# Altium footprint library chipfc_libs.PCBLIB: 315 footprints (part 4 of 20)
Each footprint in its own frame and in the unit in brackets; x right, y up, seen from the top. Pads: shape width x height; smd on the part's side, far side on the other; paste and mask are expansions set on the pad; w line width, h text height; cw(c..) or ccw(c..) is an arc to the next point about the centre after c.
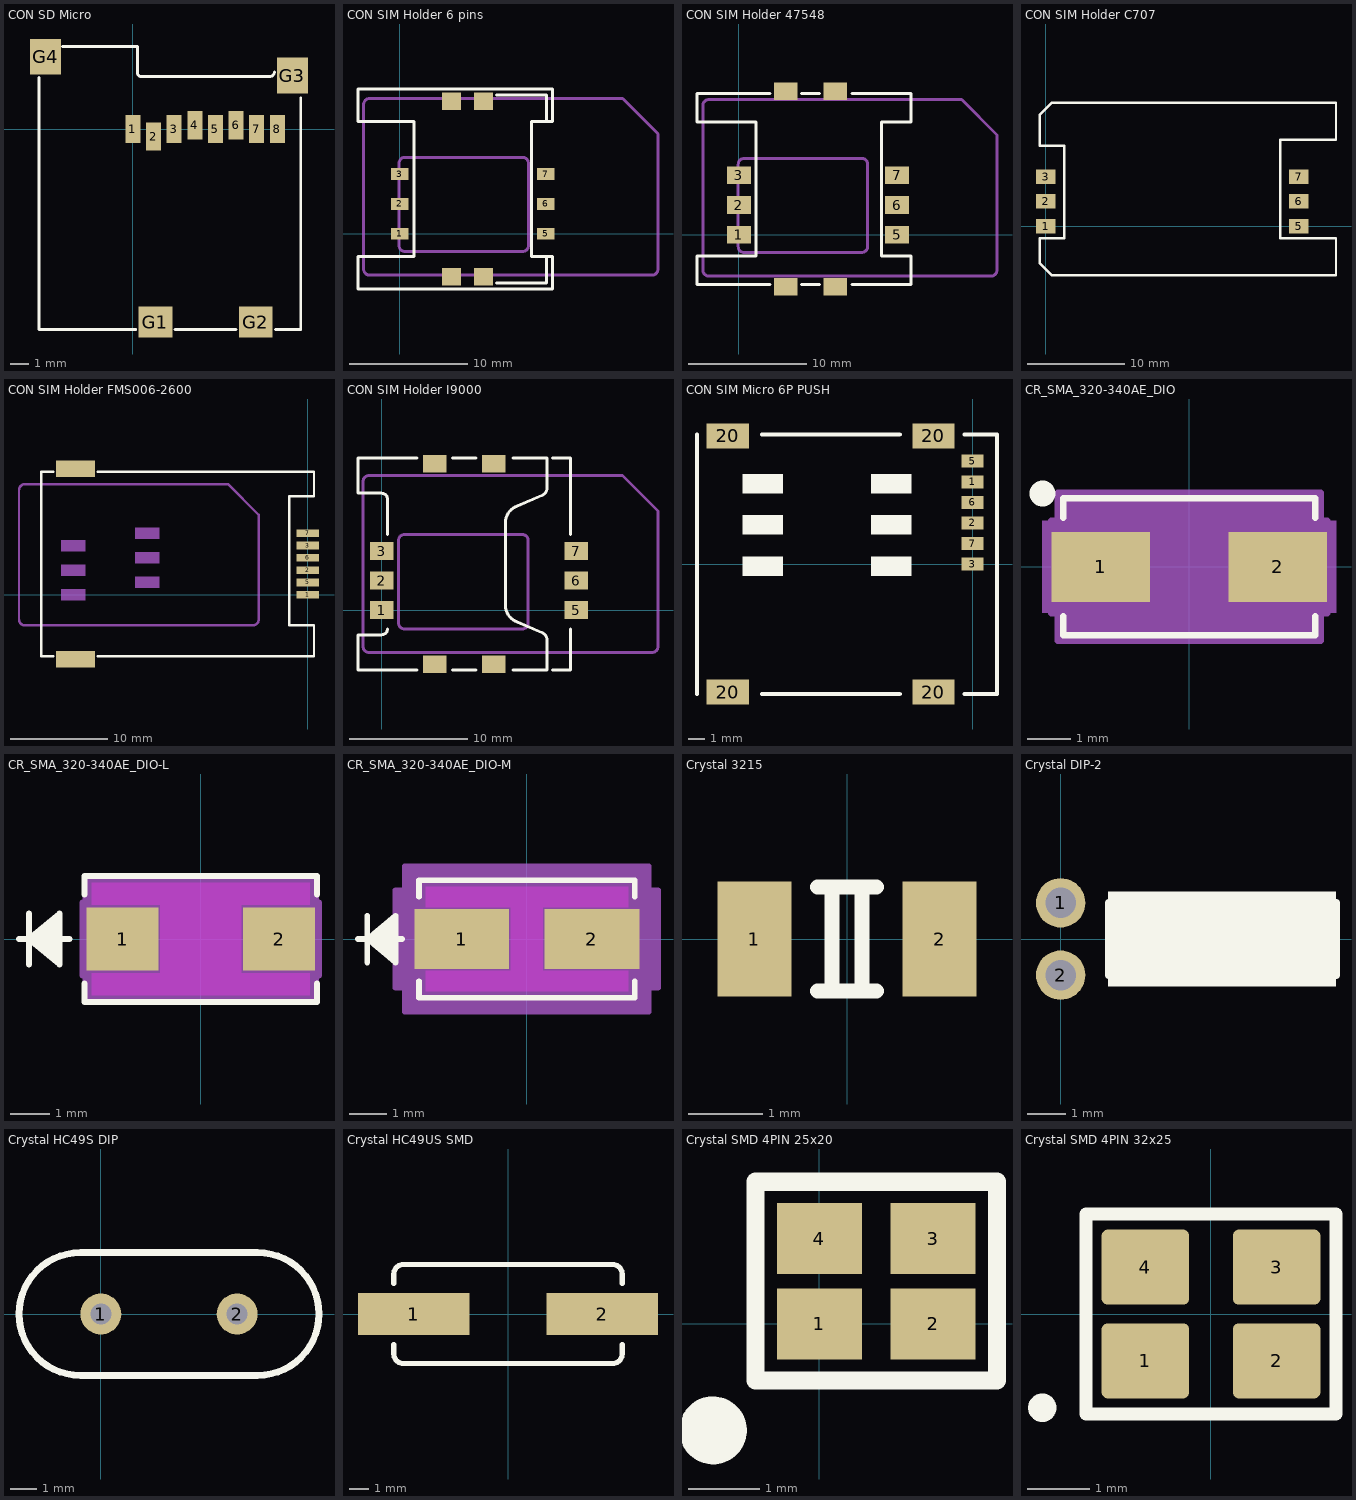
[diagram p3: the footprints below, top view; thin cyan lines are the x and y axes]

## CON SD Micro [mil]
pads (12):
  rect 31.5x59.03 smd: 1(0,0) 2(43.27,-15.73) 3(86.53,0) 4(129.8,7.87) 5(173.07,0) 6(216.33,7.87) 7(259.6,0) 8(302.87,0)
  rect 70.87x65 smd: G1(47.2,-405.13) G2(257.63,-405.13)
  rect 65x74.8 smd: G3(334.33,112.1) G4(-182.9,151.43)
Top Overlay:
  lines w6: -196.67,108.17 -196.67,-420.87 5.9,-420.87 ; -147.5,173.07 9.83,173.07 9.83,116.03 ccw(c16.72,117) 15.73,110.13 285.17,110.13 ; 88.5,-420.87 216.33,-420.87 ; 287.13,110.13 ccw(c287.13,119.97) 296.97,119.97 ; 298.93,-420.87 352.03,-420.87 352.03,64.9
3D body "User Library-micro sd soket.step": height 66.02, standoff -2.09, extent -200,-439.96 374.8,189.96

## CON SIM Holder 6 pins [mm]
pads (10):
  rect 1.5x1 smd: 1(0,0) 2(0,2.54) 3(0,5.08) 5(12.4,0) 6(12.4,2.54) 7(12.4,5.08)
  rect 1.6x1.5 smd: ""(4.4,-3.64) ""(4.4,11.26) ""(7.1,-3.64) ""(7.1,11.26)
Top Overlay:
  lines w0.254: 8.2,-4.19 12.45,-4.19 12.45,-1.94 ; 8.2,11.81 12.45,11.81 12.45,9.56 ; -3.55,-4.69 -3.55,-1.94 1.2,-1.94 1.2,9.56 -3.55,9.56 -3.55,12.31 12.95,12.31 12.95,9.56 11.2,9.56 11.2,-1.94 12.95,-1.94 12.95,-4.69 -3.55,-4.69
Mechanical 1:
  lines w0.254: -3.07,-3 ccw(c-2.57,-3) -2.57,-3.5 21.43,-3.5 ccw(c21.43,-3) 21.93,-3 21.93,8.5 18.93,11.5 -2.57,11.5 ccw(c-2.57,11) -3.07,11 -3.07,-3 ; -0.07,-1 ccw(c0.43,-1) 0.43,-1.5 10.43,-1.5 ccw(c10.43,-1) 10.93,-1 10.93,6 ccw(c10.43,6) 10.43,6.5 0.43,6.5 ccw(c0.43,6) -0.07,6 -0.07,-1

## CON SIM Holder 47548 [mm] "Molex's SIM Holder,  6 pins"
pads (10):
  rect 2x1.5 smd: 1(0,0) 2(0,2.54) 3(0,5.08) 5(13.43,0) 6(13.43,2.54) 7(13.43,5.08) ""(3.97,-4.4) ""(3.97,12.2) ""(8.17,-4.4) ""(8.17,12.2)
Top Overlay:
  lines w0.254: 1.365,-1.8 -3.57,-1.8 -3.57,-4.2 2.635,-4.2 ; 1.365,9.6 -3.57,9.6 -3.57,12 2.635,12 ; 1.43,-1.8 1.43,9.6 ; 5.33,-4.2 6.83,-4.2 ; 5.33,12 6.83,12 ; 9.62,-4.2 14.63,-4.2 14.63,-1.8 12.16,-1.8 ; 9.62,12 14.63,12 14.63,9.6 12.16,9.6 ; 12.13,-1.8 12.13,9.6
Mechanical 1:
  lines w0.254: -3.07,-3 ccw(c-2.57,-3) -2.57,-3.5 21.43,-3.5 ccw(c21.43,-3) 21.93,-3 21.93,8.5 18.93,11.5 -2.57,11.5 ccw(c-2.57,11) -3.07,11 -3.07,-3 ; -0.07,-1 ccw(c0.43,-1) 0.43,-1.5 10.43,-1.5 ccw(c10.43,-1) 10.93,-1 10.93,6 ccw(c10.43,6) 10.43,6.5 0.43,6.5 ccw(c0.43,6) -0.07,6 -0.07,-1

## CON SIM Holder C707 [mm] "SIM Holder,  6 pins"
pads (6):
  rect 2x1.5 smd: 1(0,0) 2(0,2.54) 3(0,5.08) 5(26.035,0) 6(26.035,2.54) 7(26.035,5.08)
Top Overlay:
  lines w0.254: -0.635,-3.81 0.635,-5.08 29.845,-5.08 29.845,-1.27 24.13,-1.27 24.13,8.89 29.845,8.89 29.845,12.7 0.635,12.7 -0.635,11.43 -0.635,8.255 1.905,8.255 1.905,-1.27 -0.635,-1.27 -0.635,-3.81
3D body "User Library-SIMLOCK-1.step": height 2.5, standoff 0, extent -0.395,-4.854 29.605,12.446

## CON SIM Holder FMS006-2600 [mm] "SIM Holder,  6 pins"
pads (14):
  rect 2.3x0.8 smd: 1(0,0) 2(0,2.54) 3(0,5.08) 5(0,1.27) 6(0,3.81) 7(0,6.35)
  rect 2.5x1.2 on Mech1: ""(-24.25,0) ""(-24.25,2.54) ""(-24.25,5.08) ""(-16.6,1.27) ""(-16.6,3.81) ""(-16.6,6.35)
  rect 4x1.7 smd: ""(-24,-6.675) ""(-24,13.025)
Top Overlay:
  lines w0.254: -26.289,-6.35 -27.559,-6.35 -27.559,12.7 -26.289,12.7 ; -21.717,-6.35 0.635,-6.35 0.635,-3.175 -1.905,-3.175 -1.905,10.16 0.635,10.16 0.635,12.7 -21.717,12.7
Mechanical 1:
  lines w0.254: -29.845,-2.54 ccw(c-29.21,-2.54) -29.21,-3.175 -5.715,-3.175 ccw(c-5.715,-2.54) -5.08,-2.54 -5.08,8.255 -8.255,11.43 -29.21,11.43 ccw(c-29.21,10.795) -29.845,10.795 -29.845,-2.54

## CON SIM Holder I9000 [mm] "Molex's SIM Holder,  6 pins"
pads (10):
  rect 2x1.5 smd: 1(0,0) 2(0,2.5) 3(0,5) 5(16.5,0) 6(16.5,2.5) 7(16.5,5) ""(4.5,-4.6) ""(4.5,12.4) ""(9.5,-4.6) ""(9.5,12.4)
Top Overlay:
  lines w0.254: 0.5,-1.6 cw(c0,-1.6) 0,-2.1 -2,-2.1 -2,-5.1 3,-5.1 ; 3,12.9 -2,12.9 -2,9.9 0,9.9 cw(c0,9.4) 0.5,9.4 0.5,6.4 ; 6,-5.1 8,-5.1 ; 6,12.9 8,12.9 ; 11.12,-5.1 14,-5.1 14,-2.5 ; 11.12,12.9 14,12.9 14,10.3 ; 14.008,-2.5 ccw(c13.4,-2.5) 13.6,-1.926 11.504,-1.016 cw(c12,0.4) 10.5,0.4 10.5,7.4 cw(c12,7.4) 11.504,8.816 13.6,9.726 ccw(c13.4,10.3) 14.008,10.3 ; 14.5,-5.1 16,-5.1 16,-1.6 ; 14.5,12.9 16,12.9 16,6.4 ; 0.5,6.4 0.5,6.4
Mechanical 1:
  lines w0.254: -1.57,-3.1 ccw(c-1.07,-3.1) -1.07,-3.6 22.93,-3.6 ccw(c22.93,-3.1) 23.43,-3.1 23.43,8.4 20.43,11.4 -1.07,11.4 ccw(c-1.07,10.9) -1.57,10.9 -1.57,-3.1 ; 1.43,-1.1 ccw(c1.93,-1.1) 1.93,-1.6 11.93,-1.6 ccw(c11.93,-1.1) 12.43,-1.1 12.43,5.9 ccw(c11.93,5.9) 11.93,6.4 1.93,6.4 ccw(c1.93,5.9) 1.43,5.9 1.43,-1.1

## CON SIM Micro 6P PUSH [mm] "SIM Holder,  6 pins"
pads (16):
  rect 1.35x0.8 smd: 1(0,5.08) 2(0,2.54) 3(0,0) 5(0,6.35) 6(0,3.81) 7(0,1.27)
  rect 2.6x1.55 smd: 20(-15.105,-7.89) 20(-15.105,7.91) 20(-2.425,-7.89) 20(-2.425,7.91)
  rect 2.5x1.2 on Top Overlay: ""(-12.955,-0.12) ""(-12.955,2.42) ""(-12.955,4.96) ""(-5.035,-0.12) ""(-5.035,2.42) ""(-5.035,4.96)
Top Overlay:
  lines w0.254: -17,-8 -17,8 ; -13,-8 -4.5,-8 ; -13,8 -4.5,8 ; -0.5,-8 1.5,-8 1.5,8 -0.5,8
3D body "2174803-2.stp": height 1.25, standoff -0.64, extent -16,-7.745 0,7.745

## CR_SMA_320-340AE_DIO [mil]
pads (2):
  rect 89.92x64 smd: 1(-80.87,0) 2(80.87,0)
Top Overlay:
  circle w11.81: c-133.86,66.93 r5.91
  lines w6: -115,-45.1 -115,-62.5 115,-62.5 115,-45.1 ; -115,45.1 -115,62.5 115,62.5 115,45.1
Mechanical 13:
  lines w1: -110,-57.5 110,-57.5 110,57.5 -110,57.5 -110,-57.5
Mechanical 15:
  region: -120,-42 -133.86,-42 -133.86,42 -120,42 -120,67.5 120,67.5 120,42 133.86,42 133.86,-42 120,-42 120,-67.5 -120,-67.5
  lines w6: -126,-42 -126,42 -120,42 -120,67.5 120,67.5 120,42 126,42 126,-42 120,-42 120,-67.5 -120,-67.5 -120,-42 -126,-42
3D body "CR_SMA_320-340AE_DIO.step": height 95.98, standoff 0, extent -110,-57.48 110,57.48

## CR_SMA_320-340AE_DIO-L [mil]
pads (2):
  rect 71x62 smd paste+0 mask+0: 1(-77.5,0) 2(77.5,0)
Top Layer keep-out:
  region: -108,-55.5 -108,-34 108,-34 108,-55.5
  region: -108,34 -108,55.5 108,55.5 108,34
  region: -40,-34 -40,34 40,34 40,-34
Top Overlay:
  lines w6: -180,0 -130,0 ; -170,-25 -170,25 ; -140,-20 -170,0 ; -140,-15 -170,0 ; -140,-10 -170,0 ; -140,-5 -170,0 ; -140,5 -170,0 ; -140,10 -170,0 ; -140,15 -170,0 ; -140,20 -170,0 ; -115,-43.95 -115,-62.5 115,-62.5 115,-43.95 ; -115,43.95 -115,62.5 115,62.5 115,43.95 ; -170,0 -140,-25 -140,25 -170,0
Keep-Out Layer:
  region: -40,-34 -40,34 40,34 40,-34
Mechanical 13:
  lines w1: -180,0 -130,0 ; -170,-25 -170,25 ; -140,-20 -170,0 ; -140,-15 -170,0 ; -140,-10 -170,0 ; -140,-5 -170,0 ; -140,5 -170,0 ; -140,10 -170,0 ; -140,15 -170,0 ; -140,20 -170,0 ; -170,0 -140,-25 -140,25 -170,0 ; -110,-57.5 -110,57.5 110,57.5 110,-57.5 -110,-57.5
Mechanical 15:
  region: -114,-36 -117,-36 -117,36 -114,36 -114,61.5 114,61.5 114,36 117,36 117,-36 114,-36 114,-61.5 -114,-61.5
  lines w6: -117,-36 -114,-36 -114,-61.5 114,-61.5 114,-36 117,-36 117,36 114,36 114,61.5 -114,61.5 -114,36 -117,36 -117,-36
3D body "CR_SMA_320-340AE_DIO.step": height 95.98, standoff 0, extent -110,-57.48 110,57.48

## CR_SMA_320-340AE_DIO-M [mil]
pads (2):
  rect 101x64 smd paste+0 mask+0: 1(-69.5,0) 2(69.5,0)
Top Layer keep-out:
  region: -17,-34 -17,34 17,34 17,-34
  region: -108,34 -108,55.5 108,55.5 108,34
  region: -108,-55.5 -108,-34 108,-34 108,-55.5
Top Overlay:
  lines w6: -180,0 -133.1,0 ; -170,-25 -170,25 ; -140,-20 -170,0 ; -140,-15 -170,0 ; -140,-10 -170,0 ; -140,-5 -170,0 ; -140,5 -170,0 ; -140,10 -170,0 ; -140,15 -170,0 ; -140,20 -170,0 ; -115,-45.1 -115,-62.5 115,-62.5 115,-45.1 ; -115,45.1 -115,62.5 115,62.5 115,45.1 ; -170,0 -140,25 -140,-25 -170,0
Keep-Out Layer:
  region: -17,-34 -17,34 17,34 17,-34
Mechanical 13:
  lines w1: -180,0 -130,0 ; -170,-25 -170,25 ; -140,-20 -170,0 ; -140,-15 -170,0 ; -140,-10 -170,0 ; -140,-5 -170,0 ; -140,5 -170,0 ; -140,10 -170,0 ; -140,15 -170,0 ; -140,20 -170,0 ; -170,0 -140,25 -140,-25 -170,0 ; -110,-57.5 110,-57.5 110,57.5 -110,57.5 -110,-57.5
Mechanical 15:
  region: -130,-52 -140,-52 -140,52 -130,52 -130,77.5 130,77.5 130,52 140,52 140,-52 130,-52 130,-77.5 -130,-77.5
  lines w6: -140,-52 -140,52 -130,52 -130,77.5 130,77.5 130,52 140,52 140,-52 130,-52 130,-77.5 -130,-77.5 -130,-52 -140,-52
3D body "CR_SMA_320-340AE_DIO.step": height 95.98, standoff 0, extent -110,-57.48 110,57.48

## Crystal 3215 [mm] "Crystal 3.2mm x 1.5mm SMD"
pads (2):
  rect 1x1.55 smd: 1(-1.25,0) 2(1.25,0)
Top Overlay:
  lines w0.203: -0.4,-0.7 0.4,-0.7 ; -0.4,0.7 0.4,0.7 ; -0.2,-0.7 -0.2,0.7 ; 0.2,-0.7 0.2,0.7
3D body "User Library-Siward_SX3215.step": height 0.81, standoff 0, extent -1.6,-0.75 1.6,0.75

## Crystal DIP-2 [mm] "Available for crystal 32.768kHz"
pads (2):
  round 1.3 hole 0.8: 1(0,0.953) 2(0,-0.953)
Top Overlay:
  rectangle: 1.25,-1.25 7.25,1.25
  lines w0.203: 1.27,-0.953 1.27,0.953 7.25,0.953 7.25,-0.953 1.27,-0.953
3D body "User Library-DT-26-1.step": height 2.1, standoff -1.9, extent -0.1,-1 7.04,1

## Crystal HC49S DIP [mil]
pads (2):
  round 60 / inner round 60 / far side round 70 hole 31: 1(0,0) 2(200,0)
Top Overlay:
  lines w10: -30,-90 cw(c-30,0) -30,90 230,90 cw(c230,0) 230,-90 -30,-90
3D body "User Library-HC49S.STEP": height 142.73, standoff -77.74, extent -119.93,-92.96 319.93,91

## Crystal HC49US SMD [mil]
pads (2):
  rect 220.47x82.67 smd: 1(-187,0) 2(187,0)
Top Overlay:
  lines w10: -226.37,-60 -226.37,-78.73 ccw(c-206.68,-78.73) -206.68,-98.42 206.68,-98.42 ccw(c206.68,-78.73) 226.37,-78.73 226.37,-60 ; -226.37,60 -226.37,78.73 cw(c-206.68,78.73) -206.68,98.42 206.68,98.42 cw(c206.68,78.73) 226.37,78.73 226.37,60
3D body "User Library-HC49US.STEP": height 165.35, standoff 0, extent -250,-93 250,92.04

## Crystal SMD 4PIN 25x20 [mm]
pads (4):
  rect 1.2x1 smd: 1(0,0) 2(1.6,0) 3(1.6,1.2) 4(0,1.2)
Top Overlay:
  circle w0.508: c-1.5,-1.5 r0.224
  lines w0.254: -0.9,-0.8 2.5,-0.8 2.5,2 -0.9,2 -0.9,-0.8
3D body "User Library-CRY_2520.step": height 0.55, standoff 0, extent -0.45,-0.4 2.05,1.6

## Crystal SMD 4PIN 32x25 [mm]
pads (4):
  rrect15% 1.4x1.2 smd: 1(-1.05,-0.75) 2(1.05,-0.75) 3(1.05,0.75) 4(-1.05,0.75)
Top Overlay:
  circle w0.254: c-2.7,-1.5 r0.1
  lines w0.203: -2,-1.6 -2,1.6 2,1.6 2,-1.6 -2,-1.6
3D body "User Library-User Library-Siward_SX3225.step": height 0.81, standoff 0, extent -1.6,-1.25 1.6,1.25